# Altium schematic symbol library GRM1555C1H120JA01D.SchLib: 1 symbol
Pins are listed as number, name and electrical type; pins without a type are passive.

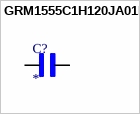
[diagram p0: symbol GRM1555C1H120JA01D]

## GRM1555C1H120JA01D
designator C?
SMD Capacitor C0G(EIA) with Capacitance: 12pF Tol. 5%. Rated Voltage: 50Vdc; MF: Murata; MP: GRM1555C1H120JA01D; SnapEDA_Link: https://www.snapeda.com/parts/GRM1555C1H120JA01D/Murata/view-part/?ref=snap; Package: 1005-2 Murata; Value: *; Check_prices: https://www.snapeda.com/parts/GRM1555C1H120JA01D/Murata/view-part/?ref=eda
footprint CAPC1005X55N
pins: 1, 2